# Altium footprint library CristalesCuarzo.PcbLib: 2 footprints
Each footprint in its own frame and in the unit in brackets; x right, y up, seen from the top. Pads: shape width x height; smd on the part's side, far side on the other; paste and mask are expansions set on the pad; w line width, h text height; cw(c..) or ccw(c..) is an arc to the next point about the centre after c.
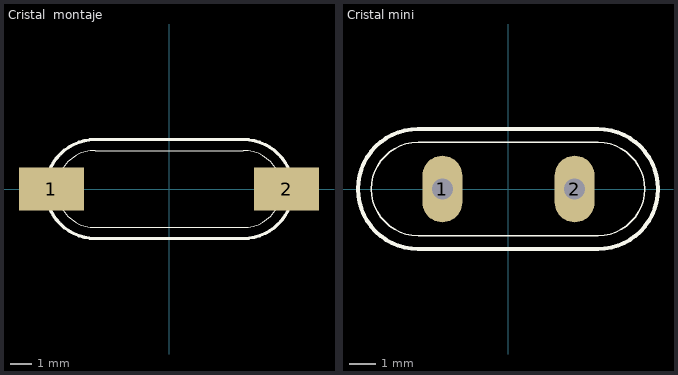
[diagram p0: the footprints below, top view; thin cyan lines are the x and y axes]

## Cristal  montaje [mm] "Cristal de cuarzo de montaje superficial"
pads (2):
  rect 3x2 smd: 1(-5.45,0) 2(5.425,0)
Top Overlay:
  lines w0.051: -3.429,-1.778 cw(c-3.429,0) -3.429,1.778 3.429,1.778 cw(c3.429,0) 3.429,-1.778 -3.429,-1.778
  lines w0.152: -3.429,-2.286 cw(c-3.429,0) -3.429,2.286 3.429,2.286 cw(c3.429,0) 3.429,-2.286 -3.429,-2.286
3D body: height 4.24, standoff 0, extent -6.075,-2.375 6.325,2.455

## Cristal mini [mm] "Cristal de cuarzo empaque pequeño"
pads (2):
  oval 1.524x2.54 hole 0.8: 1(-2.5,0) 2(2.54,0)
Top Overlay:
  lines w0.051: -3.429,-1.778 cw(c-3.429,0) -3.429,1.778 3.429,1.778 cw(c3.429,0) 3.429,-1.778 -3.429,-1.778
  lines w0.152: -3.429,-2.286 cw(c-3.429,0) -3.429,2.286 3.429,2.286 cw(c3.429,0) 3.429,-2.286 -3.429,-2.286
3D body: height 3.5, standoff -4, extent -5.625,-2.35 5.725,2.3